# Altium footprint library QFN40P650X650X90-57N-D.PcbLib: 1 footprints
Each footprint in its own frame and in the unit in brackets; x right, y up, seen from the top. Pads: shape width x height; smd on the part's side, far side on the other; paste and mask are expansions set on the pad; w line width, h text height; cw(c..) or ccw(c..) is an arc to the next point about the centre after c.
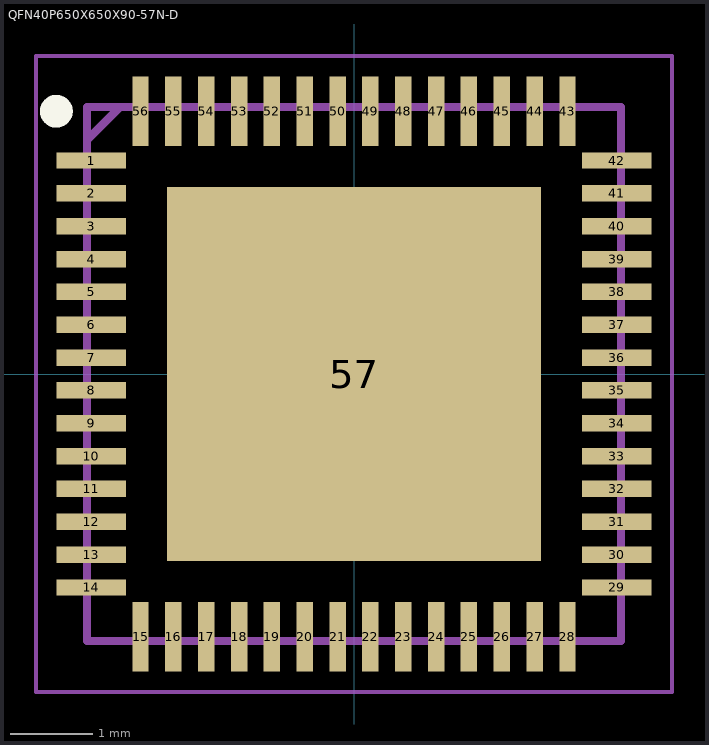
[diagram p0: the footprint, top view; thin cyan lines are the x and y axes]

## QFN40P650X650X90-57N-D [mm]
pads (57):
  rect 0.85x0.2 smd: 1(-3.2,2.6) 2(-3.2,2.2) 3(-3.2,1.8) 4(-3.2,1.4) 5(-3.2,1) 6(-3.2,0.6) 7(-3.2,0.2) 8(-3.2,-0.2) 9(-3.2,-0.6) 10(-3.2,-1) 11(-3.2,-1.4) 12(-3.2,-1.8) 13(-3.2,-2.2) 14(-3.2,-2.6) 29(3.2,-2.6) 30(3.2,-2.2) 31(3.2,-1.8) 32(3.2,-1.4) 33(3.2,-1) 34(3.2,-0.6) 35(3.2,-0.2) 36(3.2,0.2) 37(3.2,0.6) 38(3.2,1) 39(3.2,1.4) 40(3.2,1.8) 41(3.2,2.2) 42(3.2,2.6)
  rect 0.2x0.85 smd: 15(-2.6,-3.2) 16(-2.2,-3.2) 17(-1.8,-3.2) 18(-1.4,-3.2) 19(-1,-3.2) 20(-0.6,-3.2) 21(-0.2,-3.2) 22(0.2,-3.2) 23(0.6,-3.2) 24(1,-3.2) 25(1.4,-3.2) 26(1.8,-3.2) 27(2.2,-3.2) 28(2.6,-3.2) 43(2.6,3.2) 44(2.2,3.2) 45(1.8,3.2) 46(1.4,3.2) 47(1,3.2) 48(0.6,3.2) 49(0.2,3.2) 50(-0.2,3.2) 51(-0.6,3.2) 52(-1,3.2) 53(-1.4,3.2) 54(-1.8,3.2) 55(-2.2,3.2) 56(-2.6,3.2)
  rect 4.55x4.55 smd: 57(0,0)
Top Overlay:
  circle w0.2: c-3.625,3.2 r0.1
Mechanical 15:
  lines w0.1: -3.25,2.85 -2.85,3.25 ; -3.25,-3.25 3.25,-3.25 3.25,3.25 -3.25,3.25 -3.25,-3.25
Mechanical 20:
  lines w0.05: -3.875,-3.875 3.875,-3.875 3.875,3.875 -3.875,3.875 -3.875,-3.875